# Altium schematic symbol library LCD_REV2.SCHLIB: 44 symbols
Pins are listed as number, name and electrical type; pins without a type are passive.

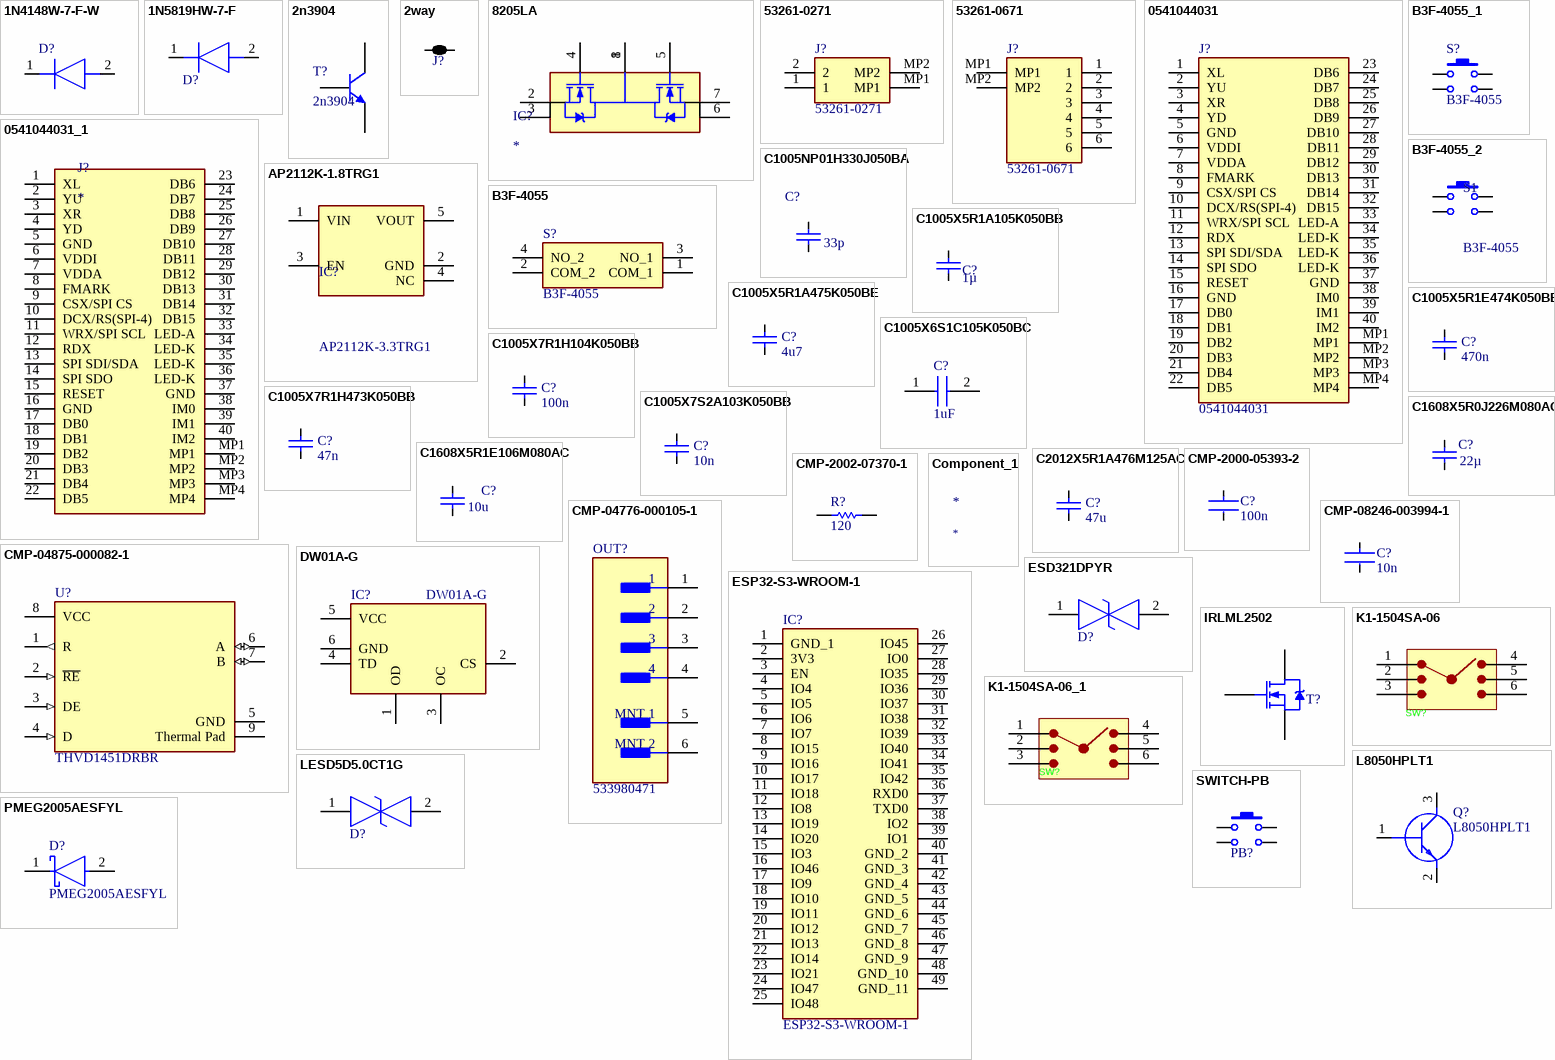
[diagram p0: symbols 1N4148W-7-F-W to SWITCH-PB]

## 1N4148W-7-F-W
designator D?  (value not drawn)
Diode; Manufacturer_Name: Diodes Incorporated; Datasheet Link: https://www.diodes.com/datasheet/download/1N4148W.pdf; Height: 1.45mm; Manufacturer_Part_Number: 1N4148W-7-F-W
footprint SOD3716X145N
pins: 1 K, 2 A

## 1N5819HW-7-F
designator D?  (value not drawn)
Diode; Manufacturer_Name: Multicomp Pro; Datasheet Link: http://www.farnell.com/datasheets/1693720.pdf; Height: 1.25mm; Manufacturer_Part_Number: 1N5819HW-7-F
footprint SOD3716X125N
pins: 1 K, 2 A

## 2n3904
designator T?
Mark: 1A
footprint SOT-23-3 (SOT-23 3PIN)
pins: 1 C, 2 E, 3 B

## 2way
designator J?, comment 2 way net tie junction  (value not drawn)  (net tie, no BOM)
ComponentLink1URL: http://www.edatools.cz/addons; ComponentLink1Description: Source; FootprintNote: LP=12mil, MP=40mil, HP=120mil
footprint 2way_LP (2 way low power net tie junction)
footprint 2way_MP (2 way medium power net tie junction)
footprint 2way_HP (2 way high power power net tie junction)
pins: 1, 2

## 8205LA
designator IC?
Integrated Circuit; Manufacturer_Name: Shenzhen Fuman Elec; Manufacturer_Part_Number: 8205LA; Description: 8-Pin TSSOP; Datasheet Link: https://www.lcsc.com/datasheet/lcsc_datasheet_2306121742_Shenzhen-Fuman-Elec-8205LA_C7420387.pdf; Height: 1.1mm
footprint SOP65P640X110-8N
pins: 1 D1/D2_1, 2 S1_1, 3 S1_2, 4 G1, 5 G2, 6 S2_1, 7 S2_2, 8 D1/D2_2

## 53261-0271
designator J?
Connector; Manufacturer_Name: Molex; Datasheet Link: https://www.molex.com/pdm_docs/sd/532610271_sd.pdf; Height: 3.65mm; Manufacturer_Part_Number: 53261-0271; Mouser Part Number: 538-53261-0271; Mouser Price/Stock: https://www.mouser.co.uk/ProductDetail/Molex/53261-0271?qs=%252B72YyncTwW%252B8%252BBjraxGf3A%3D%3D; Arrow Part Number: 53261-0271; Arrow Price/Stock: https://www.arrow.com/en/products/53261-0271/molex.html?utm_currency=USD&region=nac
footprint 532610271
pins: 1, 2, MP1, MP2

## 53261-0671
designator J?
Connector; Manufacturer_Name: Molex; Datasheet Link: https://www.molex.com/pdm_docs/sd/532610671_sd.pdf; Height: 3.6mm; Manufacturer_Part_Number: 53261-0671; Mouser Part Number: 538-53261-0671; Mouser Price/Stock: https://www.mouser.co.uk/ProductDetail/Molex/53261-0671?qs=%252B72YyncTwW9Wyr77z4J2cA%3D%3D; Arrow Part Number: 53261-0671; Arrow Price/Stock: https://www.arrow.com/en/products/53261-0671/molex?region=nac
footprint 532610671
pins: 1, 2, 3, 4, 5, 6, MP1, MP2

## 0541044031
designator J?
Connector; Manufacturer_Name: Molex; Datasheet Link: https://www.molex.com/en-us/products/part-detail-pdf/541044031?display=pdf; Height: 2.2mm; Manufacturer_Part_Number: 0541044031; Mouser Part Number: N/A; Mouser Price/Stock: https://www.mouser.co.uk/ProductDetail/Molex/0541044031?qs=PBcRNPEHKsok6%2FPBDHj5lQ%3D%3D; Arrow Part Number: 0541044031; Arrow Price/Stock: https://www.arrow.com/en/products/0541044031/molex?utm_currency=USD&region=nac
footprint 0541044031
pins: 1 XL, 2 YU, 3 XR, 4 YD, 5 GND, 6 VDDI, 7 VDDA, 8 FMARK, 9 CSX/SPI CS, 10 DCX/RS(SPI-4), 11 WRX/SPI SCL, 12 RDX, 13 SPI SDI/SDA, 14 SPI SDO, 15 RESET, 16 GND, 17 DB0, 18 DB1, 19 DB2, 20 DB3, 21 DB4, 22 DB5, 23 DB6, 24 DB7, 25 DB8, 26 DB9, 27 DB10, 28 DB11, 29 DB12, 30 DB13, 31 DB14, 32 DB15, 33 LED-A, 34 LED-K, 35 LED-K, 36 LED-K, 37 GND, 38 IM0, 39 IM1, 40 IM2, MP1, MP2, MP3, MP4

## 0541044031_1
designator J?
Connector; Manufacturer_Name: Molex; Manufacturer_Part_Number: 0541044031; Datasheet Link: https://www.molex.com/en-us/products/part-detail-pdf/541044031?display=pdf; Height: 2.2mm; Mouser Part Number: N/A; Mouser Price/Stock: https://www.mouser.co.uk/ProductDetail/Molex/0541044031?qs=PBcRNPEHKsok6%2FPBDHj5lQ%3D%3D; Arrow Part Number: 0541044031; Arrow Price/Stock: https://www.arrow.com/en/products/0541044031/molex?utm_currency=USD&region=nac
footprint 0541044031
pins: 1 XL, 2 YU, 3 XR, 4 YD, 5 GND, 6 VDDI, 7 VDDA, 8 FMARK, 9 CSX/SPI CS, 10 DCX/RS(SPI-4), 11 WRX/SPI SCL, 12 RDX, 13 SPI SDI/SDA, 14 SPI SDO, 15 RESET, 16 GND, 17 DB0, 18 DB1, 19 DB2, 20 DB3, 21 DB4, 22 DB5, 23 DB6, 24 DB7, 25 DB8, 26 DB9, 27 DB10, 28 DB11, 29 DB12, 30 DB13, 31 DB14, 32 DB15, 33 LED-A, 34 LED-K, 35 LED-K, 36 LED-K, 37 GND, 38 IM0, 39 IM1, 40 IM2, MP1, MP2, MP3, MP4

## AP2112K-1.8TRG1
designator IC?, comment AP2112K-3.3TRG1
Integrated Circuit; Manufacturer_Name: Diodes Incorporated; Manufacturer_Part_Number: AP2112K-1.8TRG1; Datasheet Link: https://www.diodes.com//assets/Datasheets/AP2112.pdf; Height: 1.4mm; Mouser Part Number: 621-AP2112K-1.8TRG1; Mouser Price/Stock: https://www.mouser.co.uk/ProductDetail/Diodes-Incorporated/AP2112K-1.8TRG1?qs=x6A8l6qLYDBx1xhw8AX2cw%3D%3D; Arrow Part Number: AP2112K-1.8TRG1; Arrow Price/Stock: https://www.arrow.com/en/products/ap2112k-1.8trg1/diodes-incorporated.html?utm_currency=USD&region=nac
footprint SOT95P285X140-5N (Footprint not found)
pins: 1 VIN, 2 GND, 3 EN, 4 NC, 5 VOUT

## B3F-4055
designator S?
Switch; Manufacturer_Name: OMRON Electronics; Datasheet Link: https://components.omron.com/us-en/sites/components.omron.com.us/files/datasheet_pdf/A070-E1.pdf; Height: 7.5mm; Manufacturer_Part_Number: B3F-4055; Mouser Part Number: 653-B3F-4055; Mouser Price/Stock: https://www.mouser.co.uk/ProductDetail/Omron-Electronics/B3F-4055?qs=B3tblJ0Nlt%2FdFVcSHGFuxQ%3D%3D; Arrow Part Number: B3F-4055; Arrow Price/Stock: https://www.arrow.com/en/products/b3f4055/omron
footprint B3F4055
pins: 1 COM_1, 2 COM_2, 3 NO_1, 4 NO_2

## B3F-4055_1
designator S?, comment B3F-4055
Switch; Manufacturer_Name: OMRON Electronics; Datasheet Link: https://components.omron.com/us-en/sites/components.omron.com.us/files/datasheet_pdf/A070-E1.pdf; Height: 7.5mm; Manufacturer_Part_Number: B3F-4055; Mouser Part Number: 653-B3F-4055; Mouser Price/Stock: https://www.mouser.co.uk/ProductDetail/Omron-Electronics/B3F-4055?qs=B3tblJ0Nlt%2FdFVcSHGFuxQ%3D%3D; Arrow Part Number: B3F-4055; Arrow Price/Stock: https://www.arrow.com/en/products/b3f4055/omron
footprint B3F4055
pins: 1, 2, 3, 4

## B3F-4055_2
designator S1, comment B3F-4055
Switch; Manufacturer_Name: OMRON Electronics; Datasheet Link: https://components.omron.com/us-en/sites/components.omron.com.us/files/datasheet_pdf/A070-E1.pdf; Height: 7.5mm; Manufacturer_Part_Number: B3F-4055; Mouser Part Number: 653-B3F-4055; Mouser Price/Stock: https://www.mouser.co.uk/ProductDetail/Omron-Electronics/B3F-4055?qs=B3tblJ0Nlt%2FdFVcSHGFuxQ%3D%3D; Arrow Part Number: B3F-4055; Arrow Price/Stock: https://www.arrow.com/en/products/b3f4055/omron
footprint B3F4055
pins: 1, 2, 3, 4

## C1005NP01H330J050BA
designator C?  value 33p  (hidden comment: C1005NP01H330J050BA)
MLCC 33pF ±5% 50V NP0 SMD 0402; Dielectric: C0G; Case Code (Imperial): 0402; Thickness: 0.022inch; Width: 0.02inch; Case Code (Metric): 1005; Length: 0.039inch; Voltage Rating (DC): 50V; Mount: Surface Mount; Max Operating Temperature: 150°C; Height: 0.5mm; Weight: 2.3E-05oz; Voltage Rating: 50V; Case/Package: 0402; Features: High Temperature; Termination: SMD/SMT; Package Quantity: 10000; RoHS Compliant: Yes; Series: C; Tolerance: 5%; Min Operating Temperature: -55°C; Packaging: Tape and Reel; Part Number: C1005NP01H330J050BA
footprint FP-C1005-050-0_05-IPC_C
footprint FP-C1005-050-0_05-MFG
footprint FP-C1005-050-0_05-IPC_A
footprint FP-C1005-050-0_05-IPC_B
pins: 1, 2

## C1005X5R1A105K050BB
designator C?  value 1µ  (hidden comment: C1005X5R1A105K050BB)
MLCC 1 uF, +/- 10%, 10 V, -55 to 85 degC, 0402 (1005 Metric), RoHS, Tape and Reel; Manufacturer: TDK; PCN Part Number: MLCCPartNumberChange30/Nov/2012; Product Training Modules: CSeriesGeneralApplicationsSEAT,CCV,andTVCLDesignToolsGuidetoReplacinganElectrolyticCapacitorwithanMLCC; Voltage - Rated: 10V; Temperature Coefficient: X5R; Online Catalog: CSeries,GeneralPurpose; Other Names: 445-4114-6; Category: Capacitors; Features: -; Lead Style: -; RoHS Information: RoHSCertificate-MLCC; Manufacturer URL: http://www.tdk.com/; Lead Spacing: -; Thickness (Max): 0.022"(0.55mm); Applications: GeneralPurpose; Tolerance: ±10%; Mounting Technology: SurfaceMount; Mounting Type: SurfaceMount,MLCC; Operating Temperature: -55°C~85°C; Datasheet URL: http://download.siliconexpert.com/pdfs/2015/4/21/15/54/45/779/tdk_/manual/37024850441143360mlcc_commercial_general_en.pdf; Package Reference: 1005; Height - Seated (Max): -; Family: CeramicCapacitors; Datasheet Version: 03/2015; Package Description: 2-Pin Surface Mount Device, Body 1 x 0.5 mm; Packaging: Digi-Reel®; Size / Dimension: 0.039"Lx0.020"W(1.00mmx0.50mm); Standard Package: 1; Package / Case: 0402(1005Metric); Ratings: -; Series: C; Part Number: C1005X5R1A105K050BB
footprint CAPC1005X55X10LL05 (Chip Capacitor, 2-Leads, Body 1.05x0.55mm, IPC High Density)
footprint CAPC1005X55X10NL05 (Chip Capacitor, 2-Leads, Body 1.05x0.55mm, IPC Medium Density)
pins: 1, 2

## C1005X5R1A475K050BE
designator C?  value 4u7  (hidden comment: C1005X5R1A475K050BE)
MLCC  4.7UF ±20 10V X5R 0402; Tolerance: 10%; Max Operating Temperature: 85°C; Case Code (Metric): 1005; Voltage Rating: 10V; Packaging: Tape and Reel; Case/Package: 0402; Features: Soft Termination; Min Operating Temperature: -55°C; Mount: Surface Mount; Case Code (Imperial): 0402; RoHS Compliant: Yes; Part Number: C1005X5R1A475K050BE
footprint FP-C1005-050-0_20-0_10-MFG
footprint FP-C1005-050-0_20-0_10-IPC_C
footprint FP-C1005-050-0_20-0_10-IPC_B
footprint FP-C1005-050-0_20-0_10-IPC_A
pins: 1, 2

## C1005X5R1E474K050BB
designator C?  value 470n  (hidden comment: C1005X5R1E474K050BB)
MLCC 470nF ±10% 25V X5R SMD 0402; Dielectric Material: Ceramic; Dissipation Factor: 10%; Case Code (Metric): 1005; RoHS Compliant: Yes; Lead Free: Lead Free; Length: 1mm; Case/Package: 0402; Termination: SMD/SMT; Dielectric: X5R; Depth: 0.5mm; Series: C; Voltage: 25V; Tolerance: 10%; Packaging: Tape and Reel; Resistor Type: Ceramic; Min Operating Temperature: -55°C; Width: 0.02inch; Thickness: 500um; Package Quantity: 10000; Case Code (Imperial): 0402; Construction: Flat; Height: 0.5mm; REACH SVHC: No SVHC; Radiation Hardening: No; Weight: 2.3E-05oz; Mount: Surface Mount; Voltage Rating (DC): 25V; Max Operating Temperature: 85°C; Part Number: C1005X5R1E474K050BB; Voltage Rating: 25V
footprint FP-C1005-050-0_05-IPC_C
pins: 1, 2

## C1005X6S1C105K050BC
designator C?  value 1uF  (hidden comment: C1005X6S1C105K050BC)
Capacitor 1UF,16V,402; Manufacturer_Name: TDK; Datasheet Link: https://product.tdk.com/info/en/catalog/datasheets/mlcc_commercial_midvoltage_en.pdf; Height: 0.55mm; Manufacturer_Part_Number: C1005X6S1C105K050BC; Mouser Part Number: 810-C1005X6S1C105K; Mouser Price/Stock: https://www.mouser.co.uk/ProductDetail/TDK/C1005X6S1C105K050BC?qs=dfay7wIA1uGWVKHpqb9RWw%3D%3D; Arrow Part Number: C1005X6S1C105K050BC; Arrow Price/Stock: https://www.arrow.com/en/products/c1005x6s1c105k050bc/tdk?utm_currency=USD&region=europe
footprint CAPC1005X55N
pins: 1, 2

## C1005X7R1H104K050BB
designator C?  value 100n  (hidden comment: C1005X7R1H104K050BB)
MLCC 100nF ±10% 50V X7R SMD 0402; Dielectric Material: Ceramic; Voltage: 50V; Min Operating Temperature: -55°C; Depth: 0.5mm; Radiation Hardening: No; RoHS Compliant: Yes; Voltage Rating (DC): 50V; Lead Free: Lead Free; Resistor Type: Ceramic; Height: 0.5mm; Dielectric: X7R; Thickness: 0.022inch; Case/Package: 0402; Case Code (Metric): 1005; Termination: SMD/SMT; Packaging: Tape and Reel; Max Operating Temperature: 125°C; Mount: Surface Mount; Package Quantity: 1; Width: 0.02inch; Weight: 2.3E-05oz; Voltage Rating: 50V; Tolerance: 10%; Construction: Flat; Case Code (Imperial): 0402; Length: 1mm; REACH SVHC: No SVHC; Series: C; Part Number: C1005X7R1H104K050BB
footprint FP-C1005-050-0_05-IPC_C
footprint FP-C1005-050-0_05-IPC_A
footprint FP-C1005-050-0_05-IPC_B
footprint FP-C1005-050-0_05-MFG
pins: 1, 2

## C1005X7R1H473K050BB
designator C?  value 47n  (hidden comment: C1005X7R1H473K050BB)
MLCC 47nF ±10% 50V X7R SMD 0402; Dielectric Material: Ceramic; Dissipation Factor: 5%; Weight: 2.3E-05oz; Max Operating Temperature: 125°C; Package Quantity: 1; Width: 0.02inch; Min Operating Temperature: -55°C; Length: 1mm; Dielectric: X7R; Voltage Rating: 50V; Number of Pins: 2; Lead Free: Lead Free; Voltage: 50V; Height: 0.5mm; Case Code (Metric): 1005; Voltage Rating (DC): 50V; Construction: Flat; Termination: SMD/SMT; Case Code (Imperial): 0402; Depth: 0.5mm; Packaging: Tape and Reel; Mount: Surface Mount; Series: C; RoHS Compliant: Yes; Tolerance: 10%; Case/Package: 0402; Thickness: 0.022inch; Radiation Hardening: No; Resistor Type: Ceramic; REACH SVHC: No SVHC; Part Number: C1005X7R1H473K050BB
footprint FP-C1005-050-0_05-IPC_C
pins: 1, 2

## C1005X7S2A103K050BB
designator C?  value 10n  (hidden comment: C1005X7S2A103K050BB)
MLCC 10nF ±10% 100V X7S SMD 0402; Dielectric Material: Ceramic; Dissipation Factor: 5%; Case Code (Imperial): 0402; Packaging: Tape and Reel; Voltage Rating (DC): 100V; Max Operating Temperature: 125°C; Min Operating Temperature: -55°C; Case Code (Metric): 1005; Weight: 2.3E-05oz; Length: 1mm; Width: 0.02inch; Tolerance: 10%; Series: C; Package Quantity: 1; RoHS Compliant: Yes; Voltage: 100V; Resistor Type: Ceramic; Number of Pins: 2; Mount: Surface Mount; Height: 0.5mm; Termination: SMD/SMT; Dielectric: X7S; Thickness: 0.022inch; REACH SVHC: No SVHC; Lead Free: Lead Free; Voltage Rating: 100V; Case/Package: 0402; Depth: 0.5mm; Part: *; Part Number: C1005X7S2A103K050BB
footprint FP-C1005-050-0_05-IPC_B
footprint FP-C1005-050-0_05-MFG
footprint FP-C1005-050-0_05-IPC_A
footprint FP-C1005-050-0_05-IPC_C
pins: 1, 2

## C1608X5R0J226M080AC
designator C?  value 22µ  (hidden comment: C1608X5R0J226M080AC)
MLCC 22 uF, ±20%, 6.3 V, -55 to 85 degC, 1608 (0603 Metric), RoHS, Tape and Reel; PCN Part Number: MLCCPartNumberChange30/Nov/2012; Manufacturer: TDK; Temperature Coefficient: X5R; Product Training Modules: CSeriesGeneralApplicationsSEAT,CCV,andTVCLDesignToolsGuidetoReplacinganElectrolyticCapacitorwithanMLCC; Other Names: 445-8028-1; Voltage - Rated: 6.3V; Design Resources: 20WNon-IsolatedBuckLEDDriverUsingPLLNK460KG; Online Catalog: CSeries,GeneralPurpose; Kits: 445-9003-KIT-ND-KITCAPCERHICAPMLCCSMD; Tolerance: ±20%; Series: C; Thickness (Max): 0.039"(1.00mm); Mounting Type: SurfaceMount,MLCC; Ratings: -; Datasheet Version: Mar-15; Package Reference: 603; Packaging: CutTape(CT); Features: -; Package / Case: 0603(1608Metric); Family: CeramicCapacitors; Lead Spacing: -; RoHS Information: RoHSCertificate-MLCC; Manufacturer URL: http://www.tdk.com/; Lead Style: -; Category: Capacitors; Applications: GeneralPurpose; Package Description: 2-Pin Surface Mount Device, Body 1.6 x 0.8 mm; Standard Package: 1; Datasheet URL: http://www.farnell.com/datasheets/1913358.pdf; Height - Seated (Max): -; Operating Temperature: -55degC~85degC; Size / Dimension: 0.063"Lx0.031"W(1.60mmx0.80mm)
footprint CAPC1608X100X20ML10 (Chip Capacitor, 2-Leads, Body 1.70x0.90mm, IPC Low Density)
footprint CAPC1608X100X20NL10 (Chip Capacitor, 2-Leads, Body 1.70x0.90mm, IPC Medium Density)
footprint CAPC1608X100X20LL10 (Chip Capacitor, 2-Leads, Body 1.70x0.90mm, IPC High Density)
pins: 1, 2

## C1608X5R1E106M080AC
designator C?  value 10u  (hidden comment: C1608X5R1E106M080AC)
MLCC 10UF, 25V; Manufacturer_Name: TDK; Datasheet Link: https://product.tdk.com/info/en/catalog/datasheets/mlcc_commercial_midvoltage_en.pdf; Height: 0.8mm; Manufacturer_Part_Number: C1608X5R1E106M080AC; Mouser Part Number: 810-C1608X5R1E106M; Mouser Price/Stock: https://www.mouser.co.uk/ProductDetail/TDK/C1608X5R1E106M080AC?qs=dfay7wIA1uGdHfZTkqsICA%3D%3D; Arrow Part Number: C1608X5R1E106M080AC; Arrow Price/Stock: https://www.arrow.com/en/products/c1608x5r1e106m080ac/tdk.html?utm_currency=USD&region=nac
footprint CAPC1608X100X20LL10 (Chip Capacitor, 2-Leads, Body 1.70x0.90mm, IPC High Density)
footprint CAPC1608X100X20NL10 (Chip Capacitor, 2-Leads, Body 1.70x0.90mm, IPC Medium Density)
footprint CAPC1608X100X20ML10 (Chip Capacitor, 2-Leads, Body 1.70x0.90mm, IPC Low Density)
pins: 1, 2

## C2012X5R1A476M125AC
designator C?  value 47u  (hidden comment: C2012X5R1A476M125AC)
MLCC 47μF ±20% 10V X5R SMD 0805 Multilayer Ceramic Capacitors; RoHS Compliant: Yes; Dielectric: X5R; Case Code (Imperial): 0805; Min Operating Temperature: -55°C; Length: 2mm; Voltage Rating: 10V; Lead Free: Lead Free; Weight: 0.000194oz; Resistor Type: Ceramic; Dielectric Material: Ceramic; Max Operating Temperature: 85°C; Height: 1.25mm; Width: 0.049inch; Depth: 1.25mm; Termination: SMD/SMT; Case/Package: 0805; Voltage Rating (DC): 10V; Voltage: 10V; Thickness: 0.057inch; Tolerance: 20%; REACH SVHC: No SVHC; Package Quantity: 1; Series: C; Case Code (Metric): 2012; Mount: Surface Mount; Packaging: Tape and Reel; Part Number: C2012X5R1A476M125AC
footprint FP-C2012-125-0_2-IPC_B
footprint FP-C2012-125-0_2-MFG
footprint FP-C2012-125-0_2-IPC_A
footprint FP-C2012-125-0_2-IPC_C
pins: 1, 2

## CMP-2000-05393-2
designator C?, comment value 100n  (hidden comment: C1005X7R1H104K050BB)
Multilayer Ceramic Capacitors 100nF ±10% 50V X7R SMD 0402; Voltage: 50V; Dielectric Material: Ceramic; Min Operating Temperature: -55°C; Depth: 0.5mm; Radiation Hardening: No; RoHS Compliant: Yes; Voltage Rating (DC): 50V; Lead Free: Lead Free; Resistor Type: Ceramic; Height: 0.5mm; Dielectric: X7R; Thickness: 0.022inch; Case/Package: 0402; Case Code (Metric): 1005; Termination: SMD/SMT; Capacitance: 100nF; Packaging: Tape and Reel; Max Operating Temperature: 125°C; Mount: Surface Mount; Package Quantity: 1; Width: 0.02inch; Weight: 2.3E-05oz; Voltage Rating: 50V; Tolerance: 10%; Construction: Flat; Case Code (Imperial): 0402; Length: 1mm; REACH SVHC: No SVHC; Series: C
footprint FP-C1005-050-0_05-IPC_C
footprint FP-C1005-050-0_05-IPC_A
footprint FP-C1005-050-0_05-IPC_B
footprint FP-C1005-050-0_05-MFG
pins: 1, 2

## CMP-2002-07370-1
designator R?, comment value 120  (hidden comment: RC0402FR-07120RL)
Manufacturer: Yageo / Phycomp; Part Number: RC0402FR-07120RL
footprint RESC1005X40X25NL05T10 (Chip Resistor, 2-Leads, Body 1.00x0.50mm, IPC Medium Density)
footprint RESC1005X40X25LL05T10 (Chip Resistor, 2-Leads, Body 1.00x0.50mm, IPC High Density)
footprint RESC1005X40X25ML05T10 (Chip Resistor, 2-Leads, Body 1.00x0.50mm, IPC Low Density)
pins: 1, 2
1 alternate drawing of the same symbol

## CMP-04776-000105-1
designator OUT?, comment 533980471
CONN HEADER SMD 4POS 1.25MM; Manufacturer: Molex; Conn Gender: Male; Conn Orientation: Vertical; Standoff Height: 0.05mm; Number Of Contacts: 4; Current Rating: 1A; Voltage Rating: 125V; Package: 0; ComponentLink2Description: Datasheet; ComponentLink2URL: https://www.molex.com/pdm_docs/ps/PS-51021-024-001.pdf; Ambient Temperature Range Low: -40°C; Category: Conn; Automotive: No; Number Of Rows: 1; Device Class L3: unset; Ambient Temperature Range High: +105°C; Height: 5.1mm; Lead Free: Yes; Pitch: 1.25mm; Contact Material: Tin; Footprint Url: https://www.molex.com/pdm_docs/sd/533980471_sd.pdf; Octopart: https://octopart.com/53398-0471-molex-655296; Temperature Range Low: -40°C; Device Class L2: Headers and Wire Housings; Temperature: -40°C to +105°C; Digikey Description: CONN HEADER SMD 4POS 1.25MM; RoHS: TRUE; Manufacturer Part Number: 533980471; Device Class L1: Connectors; Temperature Range High: +105°C
footprint FP-533980471-MFG
pins: 1, 2, 3, 4, 5 MNT 1, 6 MNT 2

## CMP-04875-000082-1
designator U?, comment THVD1451DRBR
IC TRANSCEIVER FULL 1/1 8VSON; Simplex/Duplex: Full Duplex; Max Operating Temperature: 125°C; Min Operating Temperature: -40°C
footprint FP-DRB0008F-IPC_C
footprint FP-DRB0008F-IPC_A
footprint FP-DRB0008F-MFG
footprint FP-DRB0008F-IPC_B
pins: 1 R (out), 2 ~{RE} (in), 3 DE (in), 4 D (in), 5 GND (power), 6 A (io), 7 B (io), 8 VCC (power), 9 Thermal Pad (power)

## CMP-08246-003994-1
designator C?, comment value 10n  (hidden comment: C1005X7R1H103K050BB)
Multilayer Ceramic Capacitors 10nF ±10% 50V X7R SMD 0402; Dissipation Factor: 5%; Tolerance: 10%; Number of Pins: 2; Dielectric: X7R; Dielectric Material: Ceramic; Voltage: 50V; Min Operating Temperature: -55°C; Resistor Type: Ceramic; Weight: 2.3E-05oz; Series: C; Case Code (Metric): 1005; Height: 0.5mm; Case/Package: 0402; Thickness: 0.022inch; Construction: Flat; Mount: Surface Mount; Package Quantity: 1; Width: 0.02inch; Length: 1mm; REACH SVHC: No SVHC; Capacitance: 10nF; Case Code (Imperial): 0402; Lead Free: Lead Free; Packaging: Tape and Reel; Max Operating Temperature: 125°C; Termination: SMD/SMT; Depth: 0.5mm; Voltage Rating: 50V; Voltage Rating (DC): 50V
footprint FP-C1005-050-0_05-IPC_C
footprint FP-C1005-050-0_05-IPC_B
footprint FP-C1005-050-0_05-IPC_A
footprint FP-C1005-050-0_05-MFG
pins: 1, 2

## Component_1
designator *

## DW01A-G
designator IC?
Integrated Circuit; Manufacturer_Name: Fortune Semiconductor Corporation; Datasheet Link: http://acoptex.com/uploads/DW01A.pdf; Height: 1.35mm; Manufacturer_Part_Number: DW01A-G
footprint SOT95P280X135-6N
pins: 1 OD, 2 CS, 3 OC, 4 TD, 5 VCC, 6 GND

## ESD321DPYR
designator D?  (value not drawn)
TVS Diode (Bi-directional); Manufacturer_Name: Texas Instruments; Datasheet Link: http://www.ti.com/lit/gpn/esd321; Manufacturer_Part_Number: ESD321DPYR; Mouser Part Number: 595-ESD321DPYR; Mouser Price/Stock: https://www.mouser.co.uk/ProductDetail/Texas-Instruments/ESD321DPYR?qs=w%2Fv1CP2dgqoz82xSjB3hKw%3D%3D; Arrow Part Number: ESD321DPYR; Arrow Price/Stock: https://www.arrow.com/en/products/esd321dpyr/texas-instruments?region=nac
footprint DPY(R-PX1SON-N2)
pins: 1, 2

## ESP32-S3-WROOM-1
designator IC?
Integrated Circuit; Manufacturer_Name: Espressif Systems; Datasheet Link: https://www.mouser.com/catalog/specsheets/Espressif_ESP32_S3_WROOM_1_1U_Preliminary.pdf; Height: 3.25mm; Manufacturer_Part_Number: ESP32-S3-WROOM-1
footprint ESP32S3WROOM1
pins: 1 GND_1, 2 3V3, 3 EN, 4 IO4, 5 IO5, 6 IO6, 7 IO7, 8 IO15, 9 IO16, 10 IO17, 11 IO18, 12 IO8, 13 IO19, 14 IO20, 15 IO3, 16 IO46, 17 IO9, 18 IO10, 19 IO11, 20 IO12, 21 IO13, 22 IO14, 23 IO21, 24 IO47, 25 IO48, 26 IO45, 27 IO0, 28 IO35, 29 IO36, 30 IO37, 31 IO38, 32 IO39, 33 IO40, 34 IO41, 35 IO42, 36 RXD0, 37 TXD0, 38 IO2, 39 IO1, 40 GND_2, 41 GND_3, 42 GND_4, 43 GND_5, 44 GND_6, 45 GND_7, 46 GND_8, 47 GND_9, 48 GND_10, 49 GND_11

## IRLML2502
designator T?  (value not drawn)
POWER N-ch MOSFET
footprint SOT-23
pins: 1 G, 2 S, 3 D

## K1-1504SA-06
designator SW?  (value not drawn)
Manufacturer: 韩国韩荣; Add into BOM: yes; Symbol: K1-1504SA-06; Device: K1-1504SA-06; LCSC Part Name: K1-1504SA-06; Supplier Part: C136712; Manufacturer Part: K1-1504SA-06; Supplier Footprint: SMD,10x10mm; JLCPCB Part Class: Extended Part; Datasheet: https://item.szlcsc.com/datasheet/K1-1504SA-06/148028.html; Supplier: LCSC; Convert to PCB: yes; manufactu: *
footprint SW-SMD_K1-1504SA-06
3D model SW-SMD_K1-1504SA-06
pins: 1 COM, 2 COM, 3 COM, 4 COM, 5 COM, 6 COM

## K1-1504SA-06_1
designator SW?, comment K1-1504SA-06  (value not drawn)
Manufacturer: 韩国韩荣; Add into BOM: yes; Symbol: K1-1504SA-06; Device: K1-1504SA-06; LCSC Part Name: K1-1504SA-06; Supplier Part: C136712; Manufacturer Part: K1-1504SA-06; Supplier Footprint: SMD,10x10mm; JLCPCB Part Class: Extended Part; Datasheet: https://item.szlcsc.com/datasheet/K1-1504SA-06/148028.html; Supplier: LCSC; Convert to PCB: yes; manufactu: *
footprint SW-SMD_K1-1504SA-06
3D model SW-SMD_K1-1504SA-06
pins: 1 COM, 2 COM, 3 COM, 4 COM, 5 COM, 6 COM

## L8050HPLT1
designator Q?
Transistor BJT NPN; Manufacturer_Name: ALTIUM; Datasheet Link: https://www.digchip.com/datasheets/parts/datasheet/985/L8050HPLT1-pdf.php; Height: 1.11mm; Manufacturer_Part_Number: L8050HPLT1
footprint SOT96P237X111-3N
pins: 1 B, 2 E, 3 C

## LESD5D5.0CT1G
designator D?  (value not drawn)
TVS Diode (Bi-directional); Manufacturer_Name: LRC; Height: 0.7mm; Manufacturer_Part_Number: LESD5D5.0CT1G
footprint LESD5D50CT1G
pins: 1, 2

## PMEG2005AESFYL
designator D?
DIODE SCHOTTKY 20V 0.5A SOD962; Manufacturer: Nexperia; Max Junction Temp: +150°C; Peak Reverse Current: 10uA; Capacitance: 25pF; Forward Current: 0.71A; Max Surge Forward Current: 4.5A; Value: 25pF; Lead Free: Yes; ComponentLink2Description: Datasheet; Octopart: https://octopart.com/pmeg2005aesfyl-nexperia-78741393; Ambient Temperature Range High: +150°C; Height: 0.32mm; Footprint Url: https://assets.nexperia.com/documents/outline-drawing/SOD962-2.pdf; Automotive: No; Device Class L2: Diodes; Ambient Temperature Range Low: -55°C; Device Class L3: Schottky Diodes; ComponentLink2URL: https://assets.nexperia.com/documents/data-sheet/PMEG2005AESF.pdf; Reverse Voltage: 20V; Temperature: to +150°C; Temperature Range High: +150°C; Device Class L1: Discrete Semiconductors; RoHS: TRUE; Digikey Description: DIODE SCHOTTKY 20V 0.5A SOD962; Category: Diode; Package: SOD962; Manufacturer Part Number: PMEG2005AESFYL
footprint FP-PMEG2005AESFYL-MFG
pins: 1 K, 2 A

## SWITCH-PB
designator PB?, comment Push Button  (value not drawn)
footprint PB-SMD-3
footprint PB-SMD-1
footprint PB-SMD-2
footprint PB-1 (SHORT PUSH BUTTON)
footprint PB-2
footprint PB-3 (12mmx12mm)
pins: 1, 2, 3, 4

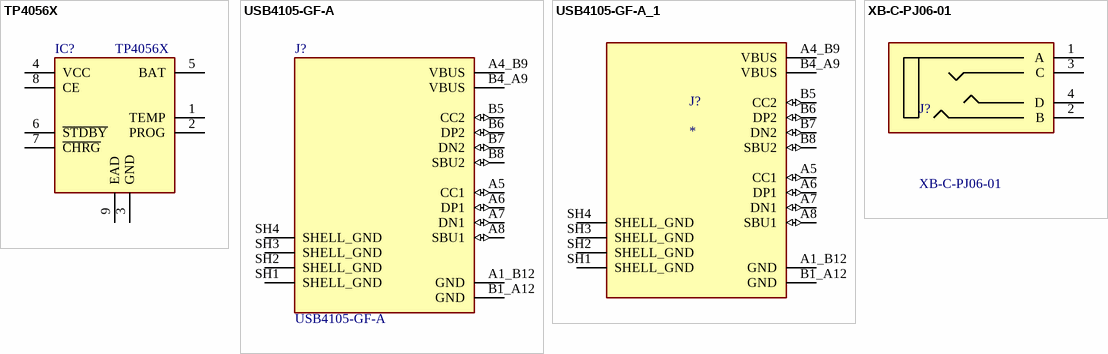
[diagram p1: symbols TP4056X to XB-C-PJ06-01]

## TP4056X
designator IC?
Integrated Circuit; Manufacturer_Name: Nanjing Extension Microelectronics; Datasheet Link: https://datasheet.lcsc.com/szlcsc/Nanjing-Extension-Microelectronics-TP4056X_C191323.pdf; Height: 1.75mm; Manufacturer_Part_Number: TP4056X
footprint SOIC127P600X175-9N
pins: 1 TEMP, 2 PROG, 3 GND, 4 VCC, 5 BAT, 6 ~{STDBY}, 7 ~{CHRG}, 8 CE, 9 EAD

## USB4105-GF-A
designator J?
MF: {'manufacturer': u'GCT'}; Package: None; Price: None; Value: *; MP: USB4105-GF-A; Availability: Unavailable
footprint GCT_USB4105-GF-A
pins: A1_B12 GND (power), A4_B9 VBUS (power), A5 CC1 (io), A6 DP1 (io), A7 DN1 (io), A8 SBU1 (io), B1_A12 GND (power), B4_A9 VBUS (power), B5 CC2 (io), B6 DP2 (io), B7 DN2 (io), B8 SBU2 (io), SH1 SHELL_GND (power), SH2 SHELL_GND (power), SH3 SHELL_GND (power), SH4 SHELL_GND (power)

## USB4105-GF-A_1
designator J?
MF: {'manufacturer': u'GCT'}; MP: USB4105-GF-A; Package: None; Price: None; Value: *; Availability: Unavailable
footprint GCT_USB4105-GF-A
pins: A1_B12 GND (power), A4_B9 VBUS (power), A5 CC1 (io), A6 DP1 (io), A7 DN1 (io), A8 SBU1 (io), B1_A12 GND (power), B4_A9 VBUS (power), B5 CC2 (io), B6 DP2 (io), B7 DN2 (io), B8 SBU2 (io), SH1 SHELL_GND (power), SH2 SHELL_GND (power), SH3 SHELL_GND (power), SH4 SHELL_GND (power)

## XB-C-PJ06-01
designator J?
3.5 Headphone socket 4.5h 4PIN diagonal port; Manufacturer: ALPSR; Datasheet: https://www.alpsr.cn/en/35-headphone-socket-patch/531376; Height: 4.5mm; Part Number: XB-C-PJ06-01
footprint XB-C-PJ06-01
pins: 1 A, 2 B, 3 C, 4 D